# EAGLE library part MA08-1J (library joakim-old)
PIN HEADER
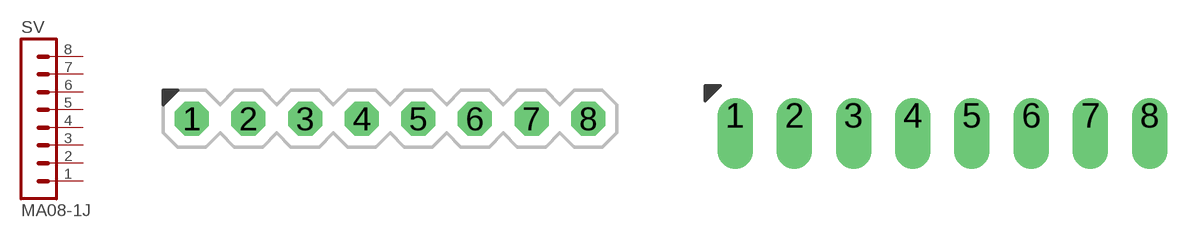
[diagram p4: symbol with the pads of MA08-1J; footprints MA08-1J, SIP-PIN08-1J]

Designator prefix SV

## MA08-1JC (OC_FARNELL: unknown; OC_NEWARK: unknown)  [MA08-1J]
1  1  pas
2  2  pas
3  3  pas
4  4  pas
5  5  pas
6  6  pas
7  7  pas
8  8  pas

## MA08-1JP  [SIP-PIN08-1J]
Pads as for MA08-1J

## Footprint MA08-1J (pad centres in mm)
PIN HEADER
drill 1.016 octagon: 1 -8.89,0; 2 -6.35,0; 3 -3.81,0; 4 -1.27,0; 5 1.27,0; 6 3.81,0; 7 6.35,0; 8 8.89,0

## Footprint SIP-PIN08-1J (pad centres in mm)
drill 1.016 offset: 1 -8.89,0; 2 -6.35,0; 3 -3.81,0; 4 -1.27,0; 5 1.27,0; 6 3.81,0; 7 6.35,0; 8 8.89,0